# EAGLE library part MAX98357A-MODULE (library moto-hud)
MAX98357A-MODULE MAX98357A I2S 3W D sinifi amfi. Kart: 18.0 x 19.0 mm - Guven: M STEP: GrabCAD 'MAX98357A breakout'
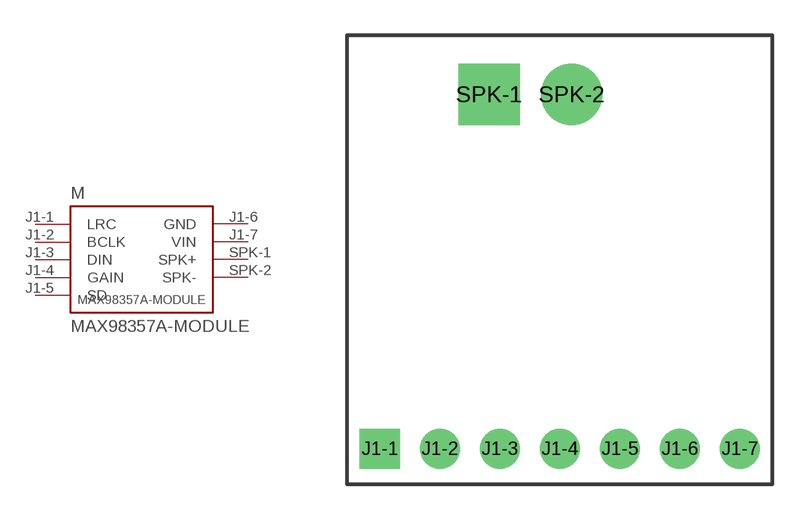
[diagram p0: symbol with the pads of MAX98357A-MODULE; footprint MAX98357A-MODULE]

Designator prefix M

## MAX98357A-MODULE (BOARD_SIZE: 18.0x19.0mm; CONFIDENCE: M)  [MAX98357A-MODULE]
J1-1  LRC  pas
J1-2  BCLK  pas
J1-3  DIN  pas
J1-4  GAIN  pas
J1-5  SD  pas
J1-6  GND  pas
J1-7  VIN  pas
SPK-1  SPK+  pas
SPK-2  SPK-  pas

## Footprint MAX98357A-MODULE (pad centres in mm)
MAX98357A I2S 3W D sinifi amfi. | Kart: 18.0 x 19.0 mm | Guven: M
drill 1 pad 1.7 square: J1-1 -7.62,-8
drill 1 pad 1.7 round: J1-2 -5.08,-8; J1-3 -2.54,-8; J1-4 0,-8; J1-5 2.54,-8; J1-6 5.08,-8; J1-7 7.62,-8
drill 1.3 pad 2.6 square: SPK-1 -3,7
drill 1.3 pad 2.6 round: SPK-2 0.5,7